# Altium schematic symbol library Schlib_DefaultComponent.SchLib: 1 symbol
Pins are listed as number, name and electrical type; pins without a type are passive.

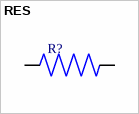
[diagram p0: symbol RES]

## RES
designator R?
pins: 1, 2